# Altium footprint library 2020-02-23_10-12-02.PcbLib: 3 footprints
Each footprint in its own frame and in the unit in brackets; x right, y up, seen from the top. Pads: shape width x height; smd on the part's side, far side on the other; paste and mask are expansions set on the pad; w line width, h text height; cw(c..) or ccw(c..) is an arc to the next point about the centre after c.
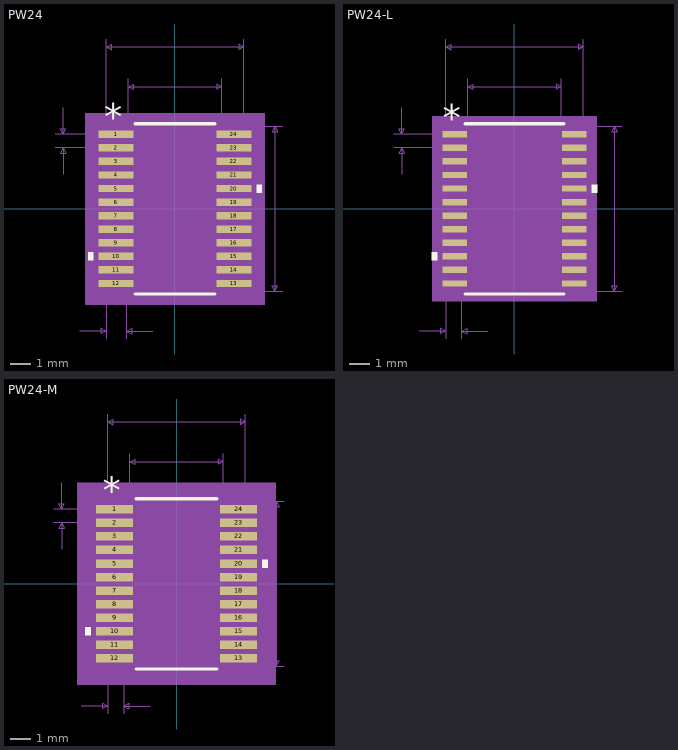
[diagram p0: the footprints below, top view; thin cyan lines are the x and y axes]

## PW24 [mil]
pads (24):
  rect 66x14 smd: 1(-111,140.75) 2(-111,115.16) 3(-111,89.57) 4(-111,63.98) 5(-111,38.39) 6(-111,12.8) 7(-111,-12.8) 8(-111,-38.39) 9(-111,-63.98) 10(-111,-89.57) 11(-111,-115.16) 12(-111,-140.75) 13(111,-140.75) 14(111,-115.16) 15(111,-89.57) 16(111,-63.98) 17(111,-38.39) 18(111,-12.8) 19(111,12.8) 20(111,38.39) 21(111,63.98) 22(111,89.57) 23(111,115.16) 24(111,140.75)
Top Overlay:
  region: -154,-82.07 -164,-82.07 -164,-97.07 -154,-97.07
  region: 154,45.89 164,45.89 164,30.89 154,30.89
  lines w6: -75,-160.5 75,-160.5 ; -75,160.5 75,160.5
  text "*" at -133.5,149.75 h50
Mechanical 5:
  region: 169,-180.5 -169,-180.5 -169,180.5 169,180.5
Mechanical 7:
  lines w1: -226,115.16 -111,115.16 ; -226,140.75 -111,140.75 ; -211,65.16 -211,115.16 ; -211,190.75 -211,140.75 ; -180,-230.5 -130,-230.5 ; -130,-245.5 -130,0 -130,320.5 ; -92,-245.5 -92,0 ; -88.5,0 -88.5,245.5 ; -42,-230.5 -92,-230.5 ; 0,-155.5 203.5,-155.5 ; 0,155.5 203.5,155.5 ; 88.5,0 88.5,245.5 ; 130,0 130,320.5 ; -211,115.16 -216,105.16 -206,105.16 -211,115.16 ; -211,140.75 -216,150.75 -206,150.75 -211,140.75 ; -130,-230.5 -140,-225.5 -140,-235.5 -130,-230.5 ; -130,305.5 130,305.5 ; -130,305.5 -120,310.5 -120,300.5 -130,305.5 ; -92,-230.5 -82,-225.5 -82,-235.5 -92,-230.5 ; -88.5,230.5 88.5,230.5 ; -88.5,230.5 -78.5,235.5 -78.5,225.5 -88.5,230.5 ; 88.5,230.5 78.5,235.5 78.5,225.5 88.5,230.5 ; 130,305.5 120,310.5 120,300.5 130,305.5 ; 188.5,-155.5 188.5,155.5 ; 188.5,-155.5 183.5,-145.5 193.5,-145.5 188.5,-155.5 ; 188.5,155.5 183.5,145.5 193.5,145.5 188.5,155.5
  text "Default Padstyle: RX66Y14D0T" at -350,-355.5 h50
  text "Pin One Padstyle: RX66Y14D0T" at -350,-415.5 h50
  text "Alt 1 Padstyle: OX60Y90D30P" at -337.5,-595.5 h50
  text "Alt 2 Padstyle: OX90Y60D30P" at -337.5,-655.5 h50
  text "0.177in/4.496mm" at -93.75,250.5 h25
  text "0.26in/6.604mm" at -87.5,325.5 h25
  text "0.311in/7.899mm" at 208.5,-12.5 h25
  text "0.026in/0.65mm" at -406,115.45 h25
  text "0.03in/0.762mm" at -198.5,-275.5 h25
Mechanical 13:
  lines w0: -12,155.5 ccw(c0,155.5) 12,155.5
  lines w1: -130,-146.75 -130,-134.75 -88.5,-134.75 -88.5,-146.75 -130,-146.75 ; -130,-121.16 -130,-109.16 -88.5,-109.16 -88.5,-121.16 -130,-121.16 ; -130,-95.57 -130,-83.57 -88.5,-83.57 -88.5,-95.57 -130,-95.57 ; -130,-69.98 -130,-57.98 -88.5,-57.98 -88.5,-69.98 -130,-69.98 ; -130,-44.39 -130,-32.39 -88.5,-32.39 -88.5,-44.39 -130,-44.39 ; -130,-18.8 -130,-6.8 -88.5,-6.8 -88.5,-18.8 -130,-18.8 ; -130,6.8 -130,18.8 -88.5,18.8 -88.5,6.8 -130,6.8 ; -130,32.39 -130,44.39 -88.5,44.39 -88.5,32.39 -130,32.39 ; -130,57.98 -130,69.98 -88.5,69.98 -88.5,57.98 -130,57.98 ; -130,83.57 -130,95.57 -88.5,95.57 -88.5,83.57 -130,83.57 ; -130,109.16 -130,121.16 -88.5,121.16 -88.5,109.16 -130,109.16 ; -130,134.75 -130,146.75 -88.5,146.75 -88.5,134.75 -130,134.75 ; -88.5,-155.5 88.5,-155.5 88.5,155.5 -88.5,155.5 -88.5,-155.5 ; 88.5,-146.75 88.5,-134.75 130,-134.75 130,-146.75 88.5,-146.75 ; 88.5,-121.16 88.5,-109.16 130,-109.16 130,-121.16 88.5,-121.16 ; 88.5,-95.57 88.5,-83.57 130,-83.57 130,-95.57 88.5,-95.57 ; 88.5,-69.98 88.5,-57.98 130,-57.98 130,-69.98 88.5,-69.98 ; 88.5,-44.39 88.5,-32.39 130,-32.39 130,-44.39 88.5,-44.39 ; 88.5,-18.8 88.5,-6.8 130,-6.8 130,-18.8 88.5,-18.8 ; 88.5,6.8 88.5,18.8 130,18.8 130,6.8 88.5,6.8 ; 88.5,32.39 88.5,44.39 130,44.39 130,32.39 88.5,32.39 ; 88.5,57.98 88.5,69.98 130,69.98 130,57.98 88.5,57.98 ; 88.5,83.57 88.5,95.57 130,95.57 130,83.57 88.5,83.57 ; 88.5,109.16 88.5,121.16 130,121.16 130,109.16 88.5,109.16 ; 88.5,134.75 88.5,146.75 130,146.75 130,134.75 88.5,134.75
  text "*" at -86,102.5 h50
Mechanical 15:
  region: -98.5,-157.75 -154,-157.75 -154,157.75 -98.5,157.75 -98.5,165.5 98.5,165.5 98.5,157.75 154,157.75 154,-157.75 98.5,-157.75 98.5,-165.5 -98.5,-165.5
  lines w6: -154,-157.75 -154,157.75 -98.5,157.75 -98.5,165.5 98.5,165.5 98.5,157.75 154,157.75 154,-157.75 98.5,-157.75 98.5,-165.5 -98.5,-165.5 -98.5,-157.75 -154,-157.75
3D body: height 10, standoff 0, extent 0,0 10,10

## PW24-L [mil]
pads (24):
  rect 46x12 smd paste+0 mask+0: 1(-113,140.75) 2(-113,115.16) 3(-113,89.57) 4(-113,63.98) 5(-113,38.39) 6(-113,12.8) 7(-113,-12.8) 8(-113,-38.39) 9(-113,-63.98) 10(-113,-89.57) 11(-113,-115.16) 12(-113,-140.75) 13(113,-140.75) 14(113,-115.16) 15(113,-89.57) 16(113,-63.98) 17(113,-38.39) 18(113,-12.8) 19(113,12.8) 20(113,38.39) 21(113,63.98) 22(113,89.57) 23(113,115.16) 24(113,140.75)
Top Overlay:
  region: -146,-82.07 -156,-82.07 -156,-97.07 -146,-97.07
  region: 146,45.89 156,45.89 156,30.89 146,30.89
  lines w6: -93.5,-160.5 93.5,-160.5 ; -93.5,160.5 93.5,160.5
  text "*" at -135.5,147.75 h50
Mechanical 5:
  region: 155,-174.5 -155,-174.5 -155,174.5 155,174.5
Mechanical 7:
  lines w1: -228,115.16 -113,115.16 ; -228,140.75 -113,140.75 ; -213,65.16 -213,115.16 ; -213,190.75 -213,140.75 ; -180,-230.5 -130,-230.5 ; -130,-245.5 -130,0 -130,320.5 ; -100,-245.5 -100,0 ; -88.5,0 -88.5,245.5 ; -50,-230.5 -100,-230.5 ; 0,-155.5 203.5,-155.5 ; 0,155.5 203.5,155.5 ; 88.5,0 88.5,245.5 ; 130,0 130,320.5 ; -213,115.16 -218,105.16 -208,105.16 -213,115.16 ; -213,140.75 -218,150.75 -208,150.75 -213,140.75 ; -130,-230.5 -140,-225.5 -140,-235.5 -130,-230.5 ; -130,305.5 130,305.5 ; -130,305.5 -120,310.5 -120,300.5 -130,305.5 ; -100,-230.5 -90,-225.5 -90,-235.5 -100,-230.5 ; -88.5,230.5 88.5,230.5 ; -88.5,230.5 -78.5,235.5 -78.5,225.5 -88.5,230.5 ; 88.5,230.5 78.5,235.5 78.5,225.5 88.5,230.5 ; 130,305.5 120,310.5 120,300.5 130,305.5 ; 188.5,-155.5 188.5,155.5 ; 188.5,-155.5 183.5,-145.5 193.5,-145.5 188.5,-155.5 ; 188.5,155.5 183.5,145.5 193.5,145.5 188.5,155.5
  text "Default Padstyle: RX46Y12D0T" at -350,-355.5 h50
  text "Pin One Padstyle: RX46Y12D0T" at -350,-415.5 h50
  text "Alt 1 Padstyle: OX60Y90D30P" at -337.5,-595.5 h50
  text "Alt 2 Padstyle: OX90Y60D30P" at -337.5,-655.5 h50
  text "0.177in/4.496mm" at -93.75,250.5 h25
  text "0.26in/6.604mm" at -87.5,325.5 h25
  text "0.311in/7.899mm" at 208.5,-12.5 h25
  text "0.026in/0.65mm" at -408,115.45 h25
  text "0.03in/0.762mm" at -202.5,-275.5 h25
Mechanical 13:
  lines w0: -12,155.5 ccw(c0,155.5) 12,155.5
  lines w1: -130,-146.75 -130,-134.75 -88.5,-134.75 -88.5,-146.75 -130,-146.75 ; -130,-121.16 -130,-109.16 -88.5,-109.16 -88.5,-121.16 -130,-121.16 ; -130,-95.57 -130,-83.57 -88.5,-83.57 -88.5,-95.57 -130,-95.57 ; -130,-69.98 -130,-57.98 -88.5,-57.98 -88.5,-69.98 -130,-69.98 ; -130,-44.39 -130,-32.39 -88.5,-32.39 -88.5,-44.39 -130,-44.39 ; -130,-18.8 -130,-6.8 -88.5,-6.8 -88.5,-18.8 -130,-18.8 ; -130,6.8 -130,18.8 -88.5,18.8 -88.5,6.8 -130,6.8 ; -130,32.39 -130,44.39 -88.5,44.39 -88.5,32.39 -130,32.39 ; -130,57.98 -130,69.98 -88.5,69.98 -88.5,57.98 -130,57.98 ; -130,83.57 -130,95.57 -88.5,95.57 -88.5,83.57 -130,83.57 ; -130,109.16 -130,121.16 -88.5,121.16 -88.5,109.16 -130,109.16 ; -130,134.75 -130,146.75 -88.5,146.75 -88.5,134.75 -130,134.75 ; -88.5,-155.5 88.5,-155.5 88.5,155.5 -88.5,155.5 -88.5,-155.5 ; 88.5,-146.75 88.5,-134.75 130,-134.75 130,-146.75 88.5,-146.75 ; 88.5,-121.16 88.5,-109.16 130,-109.16 130,-121.16 88.5,-121.16 ; 88.5,-95.57 88.5,-83.57 130,-83.57 130,-95.57 88.5,-95.57 ; 88.5,-69.98 88.5,-57.98 130,-57.98 130,-69.98 88.5,-69.98 ; 88.5,-44.39 88.5,-32.39 130,-32.39 130,-44.39 88.5,-44.39 ; 88.5,-18.8 88.5,-6.8 130,-6.8 130,-18.8 88.5,-18.8 ; 88.5,6.8 88.5,18.8 130,18.8 130,6.8 88.5,6.8 ; 88.5,32.39 88.5,44.39 130,44.39 130,32.39 88.5,32.39 ; 88.5,57.98 88.5,69.98 130,69.98 130,57.98 88.5,57.98 ; 88.5,83.57 88.5,95.57 130,95.57 130,83.57 88.5,83.57 ; 88.5,109.16 88.5,121.16 130,121.16 130,109.16 88.5,109.16 ; 88.5,134.75 88.5,146.75 130,146.75 130,134.75 88.5,134.75
  text "*" at -86,102.5 h50
Mechanical 15:
  region: -92.5,-150.75 -140,-150.75 -140,150.75 -92.5,150.75 -92.5,159.5 92.5,159.5 92.5,150.75 140,150.75 140,-150.75 92.5,-150.75 92.5,-159.5 -92.5,-159.5
  lines w6: -140,-150.75 -140,150.75 -92.5,150.75 -92.5,159.5 92.5,159.5 92.5,150.75 140,150.75 140,-150.75 92.5,-150.75 92.5,-159.5 -92.5,-159.5 -92.5,-150.75 -140,-150.75
3D body: height 10, standoff 0, extent 0,0 10,10

## PW24-M [mil]
pads (24):
  rect 70x16 smd paste+0 mask+0: 1(-117,140.75) 2(-117,115.16) 3(-117,89.57) 4(-117,63.98) 5(-117,38.39) 6(-117,12.8) 7(-117,-12.8) 8(-117,-38.39) 9(-117,-63.98) 10(-117,-89.57) 11(-117,-115.16) 12(-117,-140.75) 13(117,-140.75) 14(117,-115.16) 15(117,-89.57) 16(117,-63.98) 17(117,-38.39) 18(117,-12.8) 19(117,12.8) 20(117,38.39) 21(117,63.98) 22(117,89.57) 23(117,115.16) 24(117,140.75)
Top Overlay:
  region: -162,-82.07 -172,-82.07 -172,-97.07 -162,-97.07
  region: 162,45.89 172,45.89 172,30.89 162,30.89
  lines w6: -76.21,-160.5 76.21,-160.5 ; -76.21,160.5 76.21,160.5
  text "*" at -139.5,151.75 h50
Mechanical 5:
  region: 187,-190.5 -187,-190.5 -187,190.5 187,190.5
Mechanical 7:
  lines w1: -232,115.16 -117,115.16 ; -232,140.75 -117,140.75 ; -217,65.16 -217,115.16 ; -217,190.75 -217,140.75 ; -180,-230.5 -130,-230.5 ; -130,-245.5 -130,0 -130,320.5 ; -100,-245.5 -100,0 ; -88.5,0 -88.5,245.5 ; -50,-230.5 -100,-230.5 ; 0,-155.5 203.5,-155.5 ; 0,155.5 203.5,155.5 ; 88.5,0 88.5,245.5 ; 130,0 130,320.5 ; -217,115.16 -222,105.16 -212,105.16 -217,115.16 ; -217,140.75 -222,150.75 -212,150.75 -217,140.75 ; -130,-230.5 -140,-225.5 -140,-235.5 -130,-230.5 ; -130,305.5 130,305.5 ; -130,305.5 -120,310.5 -120,300.5 -130,305.5 ; -100,-230.5 -90,-225.5 -90,-235.5 -100,-230.5 ; -88.5,230.5 88.5,230.5 ; -88.5,230.5 -78.5,235.5 -78.5,225.5 -88.5,230.5 ; 88.5,230.5 78.5,235.5 78.5,225.5 88.5,230.5 ; 130,305.5 120,310.5 120,300.5 130,305.5 ; 188.5,-155.5 188.5,155.5 ; 188.5,-155.5 183.5,-145.5 193.5,-145.5 188.5,-155.5 ; 188.5,155.5 183.5,145.5 193.5,145.5 188.5,155.5
  text "Default Padstyle: RX70Y16D0T" at -350,-355.5 h50
  text "Pin One Padstyle: RX70Y16D0T" at -350,-415.5 h50
  text "Alt 1 Padstyle: OX60Y90D30P" at -337.5,-595.5 h50
  text "Alt 2 Padstyle: OX90Y60D30P" at -337.5,-655.5 h50
  text "0.177in/4.496mm" at -93.75,250.5 h25
  text "0.26in/6.604mm" at -87.5,325.5 h25
  text "0.311in/7.899mm" at 208.5,-12.5 h25
  text "0.026in/0.65mm" at -412,115.45 h25
  text "0.03in/0.762mm" at -202.5,-275.5 h25
Mechanical 13:
  lines w0: -12,155.5 ccw(c0,155.5) 12,155.5
  lines w1: -130,-146.75 -130,-134.75 -88.5,-134.75 -88.5,-146.75 -130,-146.75 ; -130,-121.16 -130,-109.16 -88.5,-109.16 -88.5,-121.16 -130,-121.16 ; -130,-95.57 -130,-83.57 -88.5,-83.57 -88.5,-95.57 -130,-95.57 ; -130,-69.98 -130,-57.98 -88.5,-57.98 -88.5,-69.98 -130,-69.98 ; -130,-44.39 -130,-32.39 -88.5,-32.39 -88.5,-44.39 -130,-44.39 ; -130,-18.8 -130,-6.8 -88.5,-6.8 -88.5,-18.8 -130,-18.8 ; -130,6.8 -130,18.8 -88.5,18.8 -88.5,6.8 -130,6.8 ; -130,32.39 -130,44.39 -88.5,44.39 -88.5,32.39 -130,32.39 ; -130,57.98 -130,69.98 -88.5,69.98 -88.5,57.98 -130,57.98 ; -130,83.57 -130,95.57 -88.5,95.57 -88.5,83.57 -130,83.57 ; -130,109.16 -130,121.16 -88.5,121.16 -88.5,109.16 -130,109.16 ; -130,134.75 -130,146.75 -88.5,146.75 -88.5,134.75 -130,134.75 ; -88.5,-155.5 88.5,-155.5 88.5,155.5 -88.5,155.5 -88.5,-155.5 ; 88.5,-146.75 88.5,-134.75 130,-134.75 130,-146.75 88.5,-146.75 ; 88.5,-121.16 88.5,-109.16 130,-109.16 130,-121.16 88.5,-121.16 ; 88.5,-95.57 88.5,-83.57 130,-83.57 130,-95.57 88.5,-95.57 ; 88.5,-69.98 88.5,-57.98 130,-57.98 130,-69.98 88.5,-69.98 ; 88.5,-44.39 88.5,-32.39 130,-32.39 130,-44.39 88.5,-44.39 ; 88.5,-18.8 88.5,-6.8 130,-6.8 130,-18.8 88.5,-18.8 ; 88.5,6.8 88.5,18.8 130,18.8 130,6.8 88.5,6.8 ; 88.5,32.39 88.5,44.39 130,44.39 130,32.39 88.5,32.39 ; 88.5,57.98 88.5,69.98 130,69.98 130,57.98 88.5,57.98 ; 88.5,83.57 88.5,95.57 130,95.57 130,83.57 88.5,83.57 ; 88.5,109.16 88.5,121.16 130,121.16 130,109.16 88.5,109.16 ; 88.5,134.75 88.5,146.75 130,146.75 130,134.75 88.5,134.75
  text "*" at -86,102.5 h50
Mechanical 15:
  region: -108.5,-168.75 -172,-168.75 -172,168.75 -108.5,168.75 -108.5,175.5 108.5,175.5 108.5,168.75 172,168.75 172,-168.75 108.5,-168.75 108.5,-175.5 -108.5,-175.5
  lines w6: -172,-168.75 -172,168.75 -108.5,168.75 -108.5,175.5 108.5,175.5 108.5,168.75 172,168.75 172,-168.75 108.5,-168.75 108.5,-175.5 -108.5,-175.5 -108.5,-168.75 -172,-168.75
3D body: height 10, standoff 0, extent 0,0 10,10